# Altium footprint library 53047-0210.PcbLib: 1 footprints
Each footprint in its own frame and in the unit in brackets; x right, y up, seen from the top. Pads: shape width x height; smd on the part's side, far side on the other; paste and mask are expansions set on the pad; w line width, h text height; cw(c..) or ccw(c..) is an arc to the next point about the centre after c.
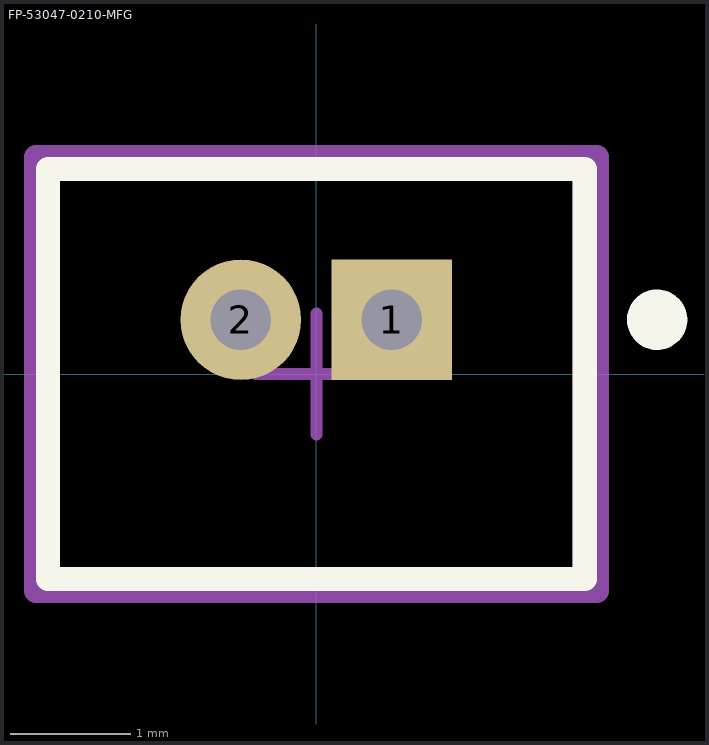
[diagram p0: the footprint, top view; thin cyan lines are the x and y axes]

## FP-53047-0210-MFG [mm]
pads (2):
  rect 1x1 hole 0.5 paste-2539.97 mask+0: 1(0.625,0.45)
  round 1 hole 0.5 paste-2539.97 mask+0: 2(-0.625,0.45)
Top Overlay:
  circle w0.25: c2.825,0.45 r0.125
  lines w0.2: -2.225,-1.7 -2.225,1.7 2.225,1.7 2.225,-1.7 -2.225,-1.7
Top Assembly:
  lines w0.2: -2.325,-1.8 -2.325,1.8 2.325,1.8 2.325,-1.8 -2.325,-1.8
  text ".Designator" at 0,0.187 h1
Top 3D Body:
  lines w0.2: -2.225,-1.7 -2.225,1.7 2.225,1.7 2.225,-1.7 -2.225,-1.7
Top Courtyard:
  lines w0.2: -2.325,-1.8 -2.325,1.8 2.325,1.8 2.325,-1.8 -2.325,-1.8
Top Component Center:
  lines w0.1: -0.5,0 0.5,0 ; 0,-0.5 0,0.5
3D body "Conn_Molex_53047-0210_eec.STEP": height 0.25, standoff 0, extent -2.325,-1.8 2.325,1.8